# Altium footprint library WR-TBL_Pluggable Connector_5.08mm.PcbLib: 295 footprints (part 19 of 19)
Each footprint in its own frame and in the unit in brackets; x right, y up, seen from the top. Pads: shape width x height; smd on the part's side, far side on the other; paste and mask are expansions set on the pad; w line width, h text height; cw(c..) or ccw(c..) is an arc to the next point about the centre after c.
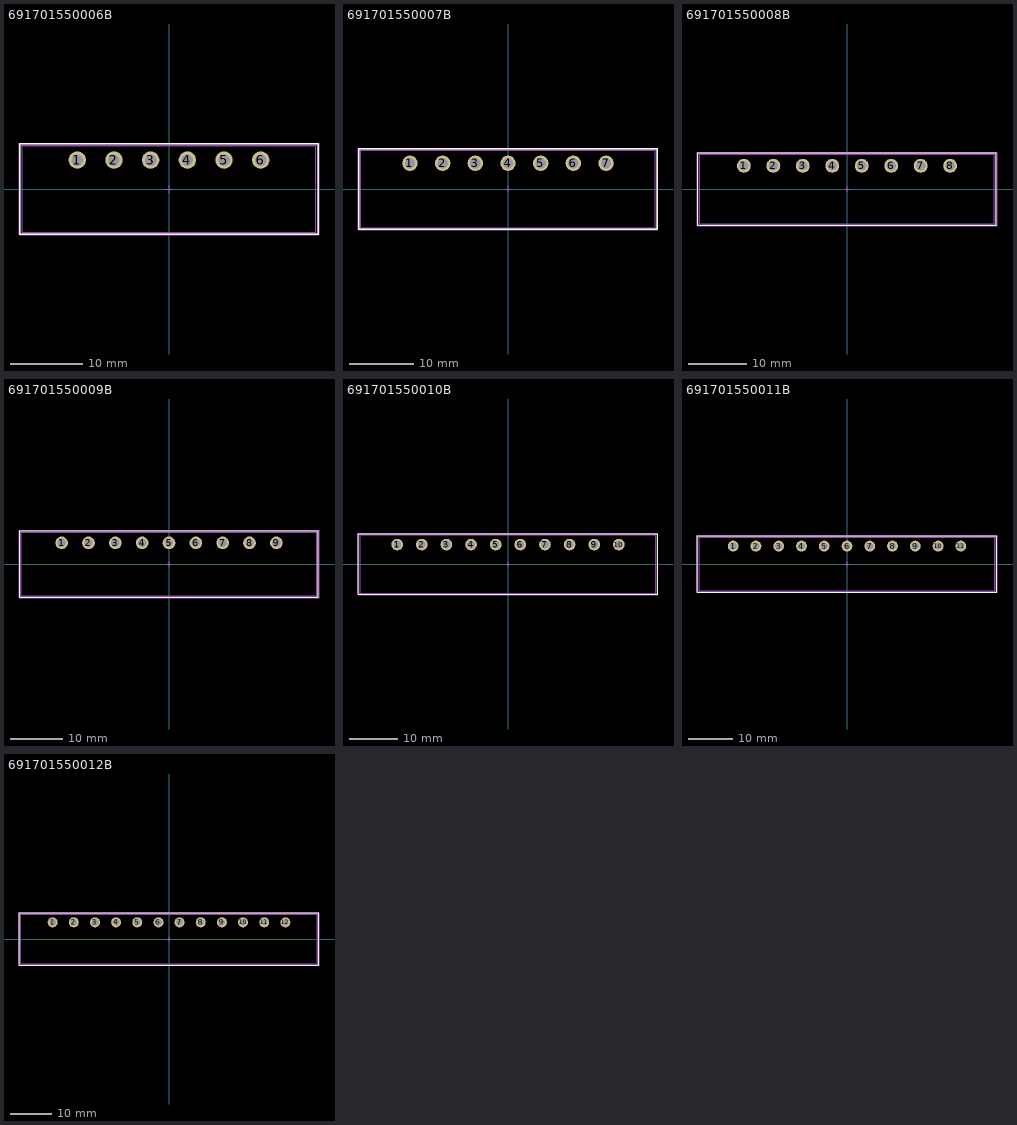
[diagram p18: the footprints below, top view; thin cyan lines are the x and y axes]

## 691701550006B [mm] "THR - 5,08mm - PCB Horizontal Flange - 06p"
height 8.4
pads (6):
  round 2.4 hole 1.6: 1(-12.7,4) 2(-7.62,4) 3(-2.54,4) 4(2.54,4) 5(7.62,4) 6(12.7,4)
Top Overlay:
  lines w0.2: -20.67,-6.25 -20.67,6.25 20.67,6.25 20.67,-6.25 -20.67,-6.25
Top Paste:
  region: -14.7,5.85 -10.7,5.85 -10.7,2.15 -14.7,2.15
  region: -9.62,5.85 -5.62,5.85 -5.62,2.15 -9.62,2.15
  region: -4.54,5.85 -0.54,5.85 -0.54,2.15 -4.54,2.15
  region: 0.54,5.85 4.54,5.85 4.54,2.15 0.54,2.15
  region: 5.62,5.85 9.62,5.85 9.62,2.15 5.62,2.15
  region: 10.7,5.85 14.7,5.85 14.7,2.15 10.7,2.15
Assembly Notes:
  text "Stencil thickness : 120 μm" at -5.156,-7.051 h1
Top Assembly:
  lines w0.1: -20.57,-6.15 20.57,-6.15 20.57,6.15 -20.57,6.15 -20.57,-6.15
Top Designator:
  text ".Designator" at -3.647,-0.357 h1
Top 3D Body:
  lines w0.1: -20.32,-6 -20.32,6 20.32,6 20.32,-6 -20.32,-6
Top Courtyard:
  lines w0.05: -20.77,-6.35 -20.77,6.35 20.77,6.35 20.77,-6.35 -20.77,-6.35
Top Component Center:
  lines w0.1: -0.5,0 0.5,0 ; 0,-0.5 0,0.5
3D body "691701550006B.stp": height 8.55, standoff -2.55, extent -20.32,-6 20.32,6.01

## 691701550007B [mm] "THR - 5,08mm - PCB Horizontal Flange - 07p"
height 8.4
pads (7):
  round 2.4 hole 1.6: 1(-15.24,4) 2(-10.16,4) 3(-5.08,4) 4(0,4) 5(5.08,4) 6(10.16,4) 7(15.24,4)
Top Overlay:
  lines w0.2: -23.21,-6.25 -23.21,6.25 23.21,6.25 23.21,-6.25 -23.21,-6.25
Top Paste:
  region: -17.24,5.85 -13.24,5.85 -13.24,2.15 -17.24,2.15
  region: -12.16,5.85 -8.16,5.85 -8.16,2.15 -12.16,2.15
  region: -7.08,5.85 -3.08,5.85 -3.08,2.15 -7.08,2.15
  region: -2,5.85 2,5.85 2,2.15 -2,2.15
  region: 3.08,5.85 7.08,5.85 7.08,2.15 3.08,2.15
  region: 8.16,5.85 12.16,5.85 12.16,2.15 8.16,2.15
  region: 13.24,5.85 17.24,5.85 17.24,2.15 13.24,2.15
Assembly Notes:
  text "Stencil thickness : 120 μm" at -5.156,-7.051 h1
Top Assembly:
  lines w0.1: -23.11,-6.15 23.11,-6.15 23.11,6.15 -23.11,6.15 -23.11,-6.15
Top Designator:
  text ".Designator" at -3.647,-0.357 h1
Top 3D Body:
  lines w0.1: -22.86,-6 -22.86,6 22.86,6 22.86,-6 -22.86,-6
Top Courtyard:
  lines w0.05: -23.31,-6.35 -23.31,6.35 23.31,6.35 23.31,-6.35 -23.31,-6.35
Top Component Center:
  lines w0.1: -0.5,0 0.5,0 ; 0,-0.5 0,0.5
3D body "691701550007B.stp": height 8.55, standoff -2.75, extent -22.86,-6 22.86,6.01

## 691701550008B [mm] "THR - 5,08mm - PCB Horizontal Flange - 08p"
height 8.4
pads (8):
  round 2.4 hole 1.6: 1(-17.78,4) 2(-12.7,4) 3(-7.62,4) 4(-2.54,4) 5(2.54,4) 6(7.62,4) 7(12.7,4) 8(17.78,4)
Top Overlay:
  lines w0.2: -25.75,-6.25 25.75,-6.25 25.75,6.25 -25.75,6.25 -25.75,-6.25
Top Paste:
  region: 15.78,5.85 19.78,5.85 19.78,2.15 15.78,2.15
  region: 10.7,5.85 14.7,5.85 14.7,2.15 10.7,2.15
  region: 5.62,5.85 9.62,5.85 9.62,2.15 5.62,2.15
  region: 0.54,5.85 4.54,5.85 4.54,2.15 0.54,2.15
  region: -4.54,5.85 -0.54,5.85 -0.54,2.15 -4.54,2.15
  region: -9.62,5.85 -5.62,5.85 -5.62,2.15 -9.62,2.15
  region: -14.7,5.85 -10.7,5.85 -10.7,2.15 -14.7,2.15
  region: -19.78,5.85 -15.78,5.85 -15.78,2.15 -19.78,2.15
Assembly Notes:
  text "Stencil thickness : 120 μm" at -5.156,-7.051 h1
Top Assembly:
  lines w0.1: -25.65,-6.15 -25.65,6.15 25.65,6.15 25.65,-6.15 -25.65,-6.15
Top Designator:
  text ".Designator" at -3.647,-0.357 h1
Top 3D Body:
  lines w0.1: -25.4,-6 25.4,-6 25.4,6 -25.4,6 -25.4,-6
Top Courtyard:
  lines w0.05: -25.85,-6.35 25.85,-6.35 25.85,6.35 -25.85,6.35 -25.85,-6.35
Top Component Center:
  lines w0.1: -0.5,0 0.5,0 ; 0,-0.5 0,0.5
3D body "691701550008B.stp": height 8.55, standoff -2.55, extent -25.4,-6 25.4,6.01

## 691701550009B [mm] "THR - 5,08mm - PCB Horizontal Flange - 09p"
height 8.4
pads (9):
  round 2.4 hole 1.6: 1(-20.32,4) 2(-15.24,4) 3(-10.16,4) 4(-5.08,4) 5(0,4) 6(5.08,4) 7(10.16,4) 8(15.24,4) 9(20.32,4)
Top Overlay:
  lines w0.2: -28.29,-6.25 28.29,-6.25 28.29,6.25 -28.29,6.25 -28.29,-6.25
Top Paste:
  region: 18.32,5.85 22.32,5.85 22.32,2.15 18.32,2.15
  region: 13.24,5.85 17.24,5.85 17.24,2.15 13.24,2.15
  region: 8.16,5.85 12.16,5.85 12.16,2.15 8.16,2.15
  region: 3.08,5.85 7.08,5.85 7.08,2.15 3.08,2.15
  region: -2,5.85 2,5.85 2,2.15 -2,2.15
  region: -7.08,5.85 -3.08,5.85 -3.08,2.15 -7.08,2.15
  region: -12.16,5.85 -8.16,5.85 -8.16,2.15 -12.16,2.15
  region: -17.24,5.85 -13.24,5.85 -13.24,2.15 -17.24,2.15
  region: -22.32,5.85 -18.32,5.85 -18.32,2.15 -22.32,2.15
Assembly Notes:
  text "Stencil thickness : 120 μm" at -5.156,-7.051 h1
Top Assembly:
  lines w0.1: -28.19,-6.15 -28.19,6.15 28.19,6.15 28.19,-6.15 -28.19,-6.15
Top Designator:
  text ".Designator" at -3.647,-0.357 h1
Top 3D Body:
  lines w0.1: -27.94,-6 27.94,-6 27.94,6 -27.94,6 -27.94,-6
Top Courtyard:
  lines w0.05: -28.39,-6.35 28.39,-6.35 28.39,6.35 -28.39,6.35 -28.39,-6.35
Top Component Center:
  lines w0.1: -0.5,0 0.5,0 ; 0,-0.5 0,0.5
3D body "691701550009B.stp": height 8.55, standoff -2.55, extent -27.94,-6 27.94,6.01

## 691701550010B [mm] "THR - 5,08mm - PCB Horizontal Flange - 10p"
height 8.4
pads (10):
  round 2.4 hole 1.6: 1(-22.86,4) 2(-17.78,4) 3(-12.7,4) 4(-7.62,4) 5(-2.54,4) 6(2.54,4) 7(7.62,4) 8(12.7,4) 9(17.78,4) 10(22.86,4)
Top Overlay:
  lines w0.2: -30.83,-6.25 30.83,-6.25 30.83,6.25 -30.83,6.25 -30.83,-6.25
Top Paste:
  region: 20.86,5.85 24.86,5.85 24.86,2.15 20.86,2.15
  region: 15.78,5.85 19.78,5.85 19.78,2.15 15.78,2.15
  region: 10.7,5.85 14.7,5.85 14.7,2.15 10.7,2.15
  region: 5.62,5.85 9.62,5.85 9.62,2.15 5.62,2.15
  region: 0.54,5.85 4.54,5.85 4.54,2.15 0.54,2.15
  region: -4.54,5.85 -0.54,5.85 -0.54,2.15 -4.54,2.15
  region: -9.62,5.85 -5.62,5.85 -5.62,2.15 -9.62,2.15
  region: -14.7,5.85 -10.7,5.85 -10.7,2.15 -14.7,2.15
  region: -19.78,5.85 -15.78,5.85 -15.78,2.15 -19.78,2.15
  region: -24.86,5.85 -20.86,5.85 -20.86,2.15 -24.86,2.15
Assembly Notes:
  text "Stencil thickness : 120 μm" at -5.156,-7.051 h1
Top Assembly:
  lines w0.1: -30.73,-6.15 -30.73,6.15 30.73,6.15 30.73,-6.15 -30.73,-6.15
Top Designator:
  text ".Designator" at -3.647,-0.357 h1
Top 3D Body:
  lines w0.1: -30.48,-6 30.48,-6 30.48,6 -30.48,6 -30.48,-6
Top Courtyard:
  lines w0.05: -30.93,-6.35 30.93,-6.35 30.93,6.35 -30.93,6.35 -30.93,-6.35
Top Component Center:
  lines w0.1: -0.5,0 0.5,0 ; 0,-0.5 0,0.5
3D body "691701550010B.stp": height 8.55, standoff -2.55, extent -30.48,-6 30.48,6.01

## 691701550011B [mm] "THR - 5,08mm - PCB Horizontal Flange - 11p"
height 8.4
pads (11):
  round 2.4 hole 1.6: 1(-25.4,4) 2(-20.32,4) 3(-15.24,4) 4(-10.16,4) 5(-5.08,4) 6(0,4) 7(5.08,4) 8(10.16,4) 9(15.24,4) 10(20.32,4) 11(25.4,4)
Top Overlay:
  lines w0.2: -33.37,-6.25 33.37,-6.25 33.37,6.25 -33.37,6.25 -33.37,-6.25
Top Paste:
  region: 23.4,5.85 27.4,5.85 27.4,2.15 23.4,2.15
  region: 18.32,5.85 22.32,5.85 22.32,2.15 18.32,2.15
  region: 13.24,5.85 17.24,5.85 17.24,2.15 13.24,2.15
  region: 8.16,5.85 12.16,5.85 12.16,2.15 8.16,2.15
  region: 3.08,5.85 7.08,5.85 7.08,2.15 3.08,2.15
  region: -2,5.85 2,5.85 2,2.15 -2,2.15
  region: -7.08,5.85 -3.08,5.85 -3.08,2.15 -7.08,2.15
  region: -12.16,5.85 -8.16,5.85 -8.16,2.15 -12.16,2.15
  region: -17.24,5.85 -13.24,5.85 -13.24,2.15 -17.24,2.15
  region: -22.32,5.85 -18.32,5.85 -18.32,2.15 -22.32,2.15
  region: -27.4,5.85 -23.4,5.85 -23.4,2.15 -27.4,2.15
Assembly Notes:
  text "Stencil thickness : 120 μm" at -5.156,-7.051 h1
Top Assembly:
  lines w0.1: -33.27,-6.15 -33.27,6.15 33.27,6.15 33.27,-6.15 -33.27,-6.15
Top Designator:
  text ".Designator" at -3.647,-0.357 h1
Top 3D Body:
  lines w0.1: -33.02,-6 33.02,-6 33.02,6 -33.02,6 -33.02,-6
Top Courtyard:
  lines w0.05: -33.47,-6.35 33.47,-6.35 33.47,6.35 -33.47,6.35 -33.47,-6.35
Top Component Center:
  lines w0.1: -0.5,0 0.5,0 ; 0,-0.5 0,0.5
3D body "691701550011B.stp": height 8.55, standoff -2.55, extent -33.02,-6 33.02,6.01

## 691701550012B [mm] "THR - 5,08mm - PCB Horizontal Flange - 12p"
height 8.4
pads (12):
  round 2.4 hole 1.6: 1(-27.94,4) 2(-22.86,4) 3(-17.78,4) 4(-12.7,4) 5(-7.62,4) 6(-2.54,4) 7(2.54,4) 8(7.62,4) 9(12.7,4) 10(17.78,4) 11(22.86,4) 12(27.94,4)
Top Overlay:
  lines w0.2: -35.91,-6.25 35.91,-6.25 35.91,6.25 -35.91,6.25 -35.91,-6.25
Top Paste:
  region: 25.94,5.85 29.94,5.85 29.94,2.15 25.94,2.15
  region: 20.86,5.85 24.86,5.85 24.86,2.15 20.86,2.15
  region: 15.78,5.85 19.78,5.85 19.78,2.15 15.78,2.15
  region: 10.7,5.85 14.7,5.85 14.7,2.15 10.7,2.15
  region: 5.62,5.85 9.62,5.85 9.62,2.15 5.62,2.15
  region: 0.54,5.85 4.54,5.85 4.54,2.15 0.54,2.15
  region: -4.54,5.85 -0.54,5.85 -0.54,2.15 -4.54,2.15
  region: -9.62,5.85 -5.62,5.85 -5.62,2.15 -9.62,2.15
  region: -14.7,5.85 -10.7,5.85 -10.7,2.15 -14.7,2.15
  region: -19.78,5.85 -15.78,5.85 -15.78,2.15 -19.78,2.15
  region: -24.86,5.85 -20.86,5.85 -20.86,2.15 -24.86,2.15
  region: -29.94,5.85 -25.94,5.85 -25.94,2.15 -29.94,2.15
Assembly Notes:
  text "Stencil thickness : 120 μm" at -5.156,-7.051 h1
Top Assembly:
  lines w0.1: -35.81,-6.15 -35.81,6.15 35.81,6.15 35.81,-6.15 -35.81,-6.15
Top Designator:
  text ".Designator" at -3.647,-0.357 h1
Top 3D Body:
  lines w0.1: -35.56,-6 35.56,-6 35.56,6 -35.56,6 -35.56,-6
Top Courtyard:
  lines w0.05: -36.01,-6.35 36.01,-6.35 36.01,6.35 -36.01,6.35 -36.01,-6.35
Top Component Center:
  lines w0.1: -0.5,0 0.5,0 ; 0,-0.5 0,0.5
3D body "691701550012B.stp": height 8.55, standoff -2.55, extent -35.56,-6 35.56,6.01